# Altium schematic symbol library Transistors-Switches-Diodes-LIB-SCH.SchLib: 24 symbols
Pins are listed as number, name and electrical type; pins without a type are passive.

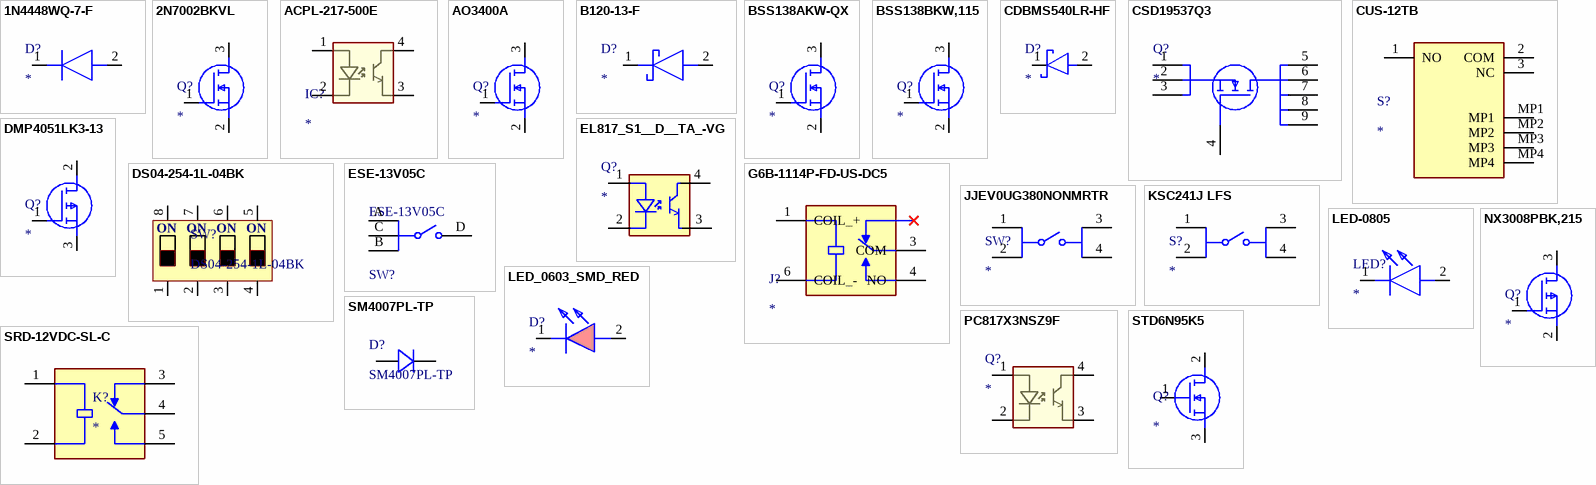
[diagram p0: symbols 1N4448WQ-7-F to STD6N95K5]

## 1N4448WQ-7-F
designator D?
Diode 100V 4A; Manufacturer: Diodes Incorporated; Manufacturer Part Number: 1N4448WQ-7-F; Datasheet Link: http://www.mouser.com/ds/2/115/ds12002-536532.pdf; Height: 1.35mm; Supplier Part Number: 621-1N4448WQ-7-F
footprint SOD3716X135N
pins: 1 K, 2 A

## 2N7002BKVL
designator Q?
N-Channel 60 V 350mA (Ta) 370mW (Ta) Surface Mount TO-236AB; Manufacturer Part Number: 2N7002BKVL; Manufacturer: Nexperia; Supply Voltage: 20V; Est Price INR: 17.7; Population Status: YES; Datasheet Link: https://assets.nexperia.com/documents/data-sheet/2N7002BK.pdf; Height: 1.1mm; Supplier Part Number: 771-2N7002BKVL; Max Current: 350mA; Package: SOT-23-3; Supplier: Mouser; Temperature Range: -55 to 150; Weight: 8mg
footprint SOT95P230X110-3N
pins: 1 G, 2 S, 3 D

## ACPL-217-500E
designator IC?
Optocoupler; Manufacturer: Avago Technologies; Manufacturer Part Number: ACPL-217-500E; Population Status: YES; Datasheet Link: https://datasheet.datasheetarchive.com/originals/distributors/SFDatasheet-4/sf-00083403.pdf; Height: 2.42mm; Supplier Part Number: 630-ACPL-217-500E
footprint SOIC127P700X242-4N
pins: 1, 2, 3, 4

## AO3400A
designator Q?
MOSFET (N-Channel); Manufacturer: Alpha & Omega Semiconductors; Manufacturer Part Number: AO3400A; Population Status: YES; Datasheet Link: http://aosmd.com/res/data_sheets/AO3400A.pdf; Height: 1.25mm
footprint SOT95P280X125-3N
pins: 1 G, 2 S, 3 D

## B120-13-F
designator D?
Schottky Diode; Manufacturer: Diodes Incorporated; Manufacturer Part Number: B120-13-F; Datasheet Link: https://www.diodes.com/assets/Datasheets/ds13002.pdf; Height: 2.4mm; Supplier Part Number: 621-B120-F
footprint DIOM5226X240N
pins: 1 K, 2 A

## BSS138AKW-QX
designator Q?
N-Channel 60 V 220mA (Ta) 270mW (Ta), 1.3W (Tc) Surface Mount SOT-323; Manufacturer Part Number: BSS138AKW-QX; Manufacturer: Nexperia; Supply Voltage: 20V; Est Price INR: 21.43; Population Status: YES; Datasheet Link: https://assets.nexperia.com/documents/data-sheet/BSS138AKW-Q.pdf; Height: 1.1mm; Supplier Part Number: 771-BSS138AKW-QX; Max Current: 220mA; Package: SC-70-3; Supplier: Mouser; Temperature Range: -55 to 175
footprint SOT65P210X110-3N
pins: 1 G, 2 S, 3 D

## BSS138BKW,115
designator Q?
MOSFET (N-Channel); Population Status: YES; Datasheet Link: https://assets.nexperia.com/documents/data-sheet/BSS138BKW.pdf; Height: 1.1mm; Supplier Part Number: 771-BSS138BKW115
footprint SOT65P210X110-3N
pins: 1 G, 2 S, 3 D

## CDBMS540LR-HF
designator D?
Schottky Diodes & Rectifiers DIODE SCHOTTKY 40V 5A SOD-123FL; Manufacturer Part Number: CDBMS540LR-HF; Manufacturer: Comchip Technology; Est Price INR: 53.11; Population Status: YES; Datasheet Link: https://www.mouser.com/datasheet/3/819/1/QW_JB114_CDBMS540LR_HF_RevA.pdf; Height: 1.1mm; Current Rating: 5A; Package: SOD-123FL-2; Supplier Part Number: 750-CDBMS540LR-HF; Supplier: Mouser; Temperature Range: -55 to 125; Weight: 30mg
footprint DIODE_SOD-123FL-CDBMS540LR-HF (Footprint not found)
pins: 1 K, 2 A

## CSD19537Q3
designator Q?
MOSFET (N-Channel); Population Status: YES; Datasheet Link: http://www.ti.com/lit/gpn/csd19537q3; Supplier Part Number: 595-CSD19537Q3
footprint DQG_VSON-CLIP
pins: 1 S, 2 S, 3 S, 4 G, 5 D, 6 D, 7 D, 8 D, 9 D

## CUS-12TB
designator S?
Switch; Manufacturer: Nidec Copal; Manufacturer Part Number: CUS-12TB; Datasheet Link: https://www.nidec-copal-electronics.com/e/catalog/switch/cus.pdf; Height: 1.4mm; Supplier Part Number: 229-CUS-12TB
footprint CUS12TB
pins: 1 NO, 2 COM, 3 NC, MP1, MP2, MP3, MP4

## DMP4051LK3-13
designator Q?
MOSFET (P-Channel); Manufacturer: Diodes Incorporated; Manufacturer Part Number: DMP4051LK3-13; Population Status: YES; Datasheet Link: https://www.diodes.com//assets/Datasheets/DMP4051LK3.pdf; Height: 2.52mm; Supplier Part Number: 621-DMP4051LK3-13
footprint ST_DPAK_1
pins: 1 G, 2 D, 3 S

## DS04-254-1L-04BK
designator SW?
DIP Switch SPST 4 Positions Short Pins 2.54mm Pitch; Manufacturer: CUI Devices; Manufacturer Part Number: DS04-254-1L-04BK
pins: 1, 2, 3, 4, 5, 6, 7, 8
text: ON

## EL817_S1__D__TA_-VG
designator Q?
Optocoupler; Manufacturer: Everlight; Manufacturer Part Number: EL817(S1)(D)(TA)-VG; Population Status: YES; Datasheet Link: http://www.mouser.com/ds/2/143/201407061834389632-598371.pdf; Height: 3.9mm; Supplier Part Number: 638-EL817S1DTA-VG
footprint SOP254P1030X390-4N (Footprint not found)
pins: 1, 2, 3, 4

## ESE-13V05C
designator SW?
Detector Switch, 1VL, Super Thin 1.2mm SPST; Manufacturer: Panasonic Industry; Electrical Life: 50000Cycles; Est Price INR: 70.82; Max Current: 10mA; Population Status: YES; Supply Voltage: 5V; Height: 1.2mm; Manufacturer Part Number: ESE-13V05C; Package: SMD/SMT; Supplier Part Number: P15892SCT-ND; Supplier: Digikey; Temperature Range: -10 to 60
footprint FP-ESE-13V05C-MFG
pins: A, B, C, D

## G6B-1114P-FD-US-DC5
designator J?
Connector; Manufacturer Part Number: G6B-1114P-FD-US-DC5; Manufacturer: OMRON Electronics; Est Price INR: 767.19; Max Current: 5A; Population Status: YES; Supply Voltage: 380 VAC, 125 VDC; Datasheet Link: https://componentsearchengine.com/Datasheets/1/G6B-1114P-FD-US-DC12.pdf; Height: 10mm; Package: TH; Supplier Part Number: 653-G6B1114PFDUSDC5; Supplier: Mouser; Weight: 4g
footprint G6B1114PFDUSDC12
pins: 1 COIL_+, 3 COM, 4 NO, 6 COIL_-

## JJEV0UG380NONMRTR
designator SW?
SWITCH DETECT SPST-NO 0.001A 5V; Manufacturer Part Number: JJEV0UG380NONMRTR; Manufacturer: TE Connectivity / P&B; Electrical Life: 100,000 Cycles; Est Price INR: 124.86; Max Current: 1mA; Population Status: YES; Datasheet Link: https://www.te.com/commerce/DocumentDelivery/DDEController?Action=srchrtrv&DocNm=2331394-1&DocType=Data%20Sheet&DocLang=English&PartCntxt=2331417-1&DocFormat=pdf; Height: 3.8mm; Package: SMD/SMT; Supplier Part Number: 506-JJEV0UG380NONMRT; Supplier: Mouser; Supply Voltage: 5V; Temperature Range: -40 to 85; Weight: 1g
footprint JJEV0UG380NONMRTR
pins: 1 COM, 2 COM, 3 NO, 4 NO

## KSC241J LFS
designator S?
Tactile Switch 1A 32VDC 3.5mm 3.5N J bend, IP67; Manufacturer: LITTELFUSE; Manufacturer Part Number: KSC241J LFS; Est Price INR: 56.37; Population Status: YES; Supply Voltage: 32V; Datasheet Link: https://mm.digikey.com/Volume0/opasdata/d220001/medias/docus/6535/KSC2%20DCT%20Datasheet.pdf; Supplier Part Number: 611-KSC241J-LFS; Height: 3.5mm; Package: SMD/SMT; Supplier: Mouser; Temperature Range: -40 to 85; Weight: 321mg; Max Current: 1A
footprint KSC241JDCTLFS
pins: 1 COM, 2 NC, 3 NO, 4 NO

## LED-0805
designator LED?
LED; Manufacturer: Lite-On; Manufacturer Part Number: LTST-C230KFKT; Datasheet Link: https://media.digikey.com/pdf/Data%20Sheets/Lite-On%20PDFs/LTST-C230KFKT_5-24-06.pdf; Height: 1.2mm; Supplier Part Number: 859-LTST-C230KFKT
footprint LEDC3216X120N
pins: 1 K, 2 A

## LED_0603_SMD_RED
designator D?
Single Colour LEDs SMD 0603 Red Clear 631nm; Manufacturer: Lite-On; Manufacturer Part Number: LTST-C190KRKT; Est Price INR: 13.05; Population Status: YES; Datasheet Link: https://media.digikey.com/pdf/Data%20Sheets/Lite-On%20PDFs/LTST-C230KFKT_5-24-06.pdf; Height: 1.2mm; Supplier Part Number: 859-LTST-C190KRKT; Package: SMD 0603; Supplier: Mouser; Temperature Range: -30 to 85; Weight: 28mg
footprint LED_0603_SMD
pins: 1 K, 2 A

## NX3008PBK,215
designator Q?
MOSFET (P-Channel); Manufacturer: Nexperia; Manufacturer Part Number: NX3008PBK,215; Est Price INR: 19.57; Max Current: 230mA; Supply Voltage: 50V; Population Status: YES; Datasheet Link: https://assets.nexperia.com/documents/data-sheet/NX3008PBK.pdf; Height: 1.1mm; Supplier Part Number: 771-NX3008PBK,215; Package: SOT-23-3; Supplier: Mouser; Temperature Range: -55 to 150; Weight: 0.008g
footprint NX3008PBK215 (Footprint not found)
pins: 1 G, 2 S, 3 D

## PC817X3NSZ9F
designator Q?
Transistor; Manufacturer: Sharp Microelectronics; Manufacturer Part Number: PC817X3NSZ9F; Max Current: 200mA; Supply Voltage: 3.3V; Population Status: YES; Datasheet Link: http://www.socle-tech.com/doc/IC%20Channel%20Product/Optoelectronic%20Components/Photocoupler/PC817X_NSZ9FSeries_SPEC.pdf; Height: 4.5mm; Supplier Part Number: 852-PC817X3NSZ9F; Supplier: Mouser; Weight: 35.56mg
footprint DIP762W60P254L460H450Q4N
pins: 1, 2, 3, 4

## SM4007PL-TP
designator D?
No Description Available; Manufacturer: MCC; Manufacturer Part Number: SM4007PL-TP
footprint DIODE_SOD-123FL_2P825X1P65_MCC
pins: 1, 2

## SRD-12VDC-SL-C
designator K?
General Purpose Non Latching 12VDC SPDT Through Hole Relays RoHS; Manufacturer: Songle Relay; Manufacturer Part Number: SRD-12VDC-SL-C; Population Status: YES; Package: NON STANDARD-5 Songle Relay
footprint RELAY_SRD-12VDC-SL-C
pins: 1 COIL1, 2 COIL2, 3 NC, 4 COM, 5 NO

## STD6N95K5
designator Q?
MOSFET (N-Channel); Manufacturer: STMicroelectronics; Manufacturer Part Number: STD6N95K5; Population Status: YES; Datasheet Link: https://www.mouser.com/datasheet/2/389/std6n95k5-955603.pdf; Height: 2mm; Supplier Part Number: 511-STD6N95K5
footprint STD13N60DM2
pins: 1 G, 2 D, 3 S